# Altium footprint library standard-case.PcbLib: 285 footprints (part 4 of 18)
Each footprint in its own frame and in the unit in brackets; x right, y up, seen from the top. Pads: shape width x height; smd on the part's side, far side on the other; paste and mask are expansions set on the pad; w line width, h text height; cw(c..) or ccw(c..) is an arc to the next point about the centre after c.
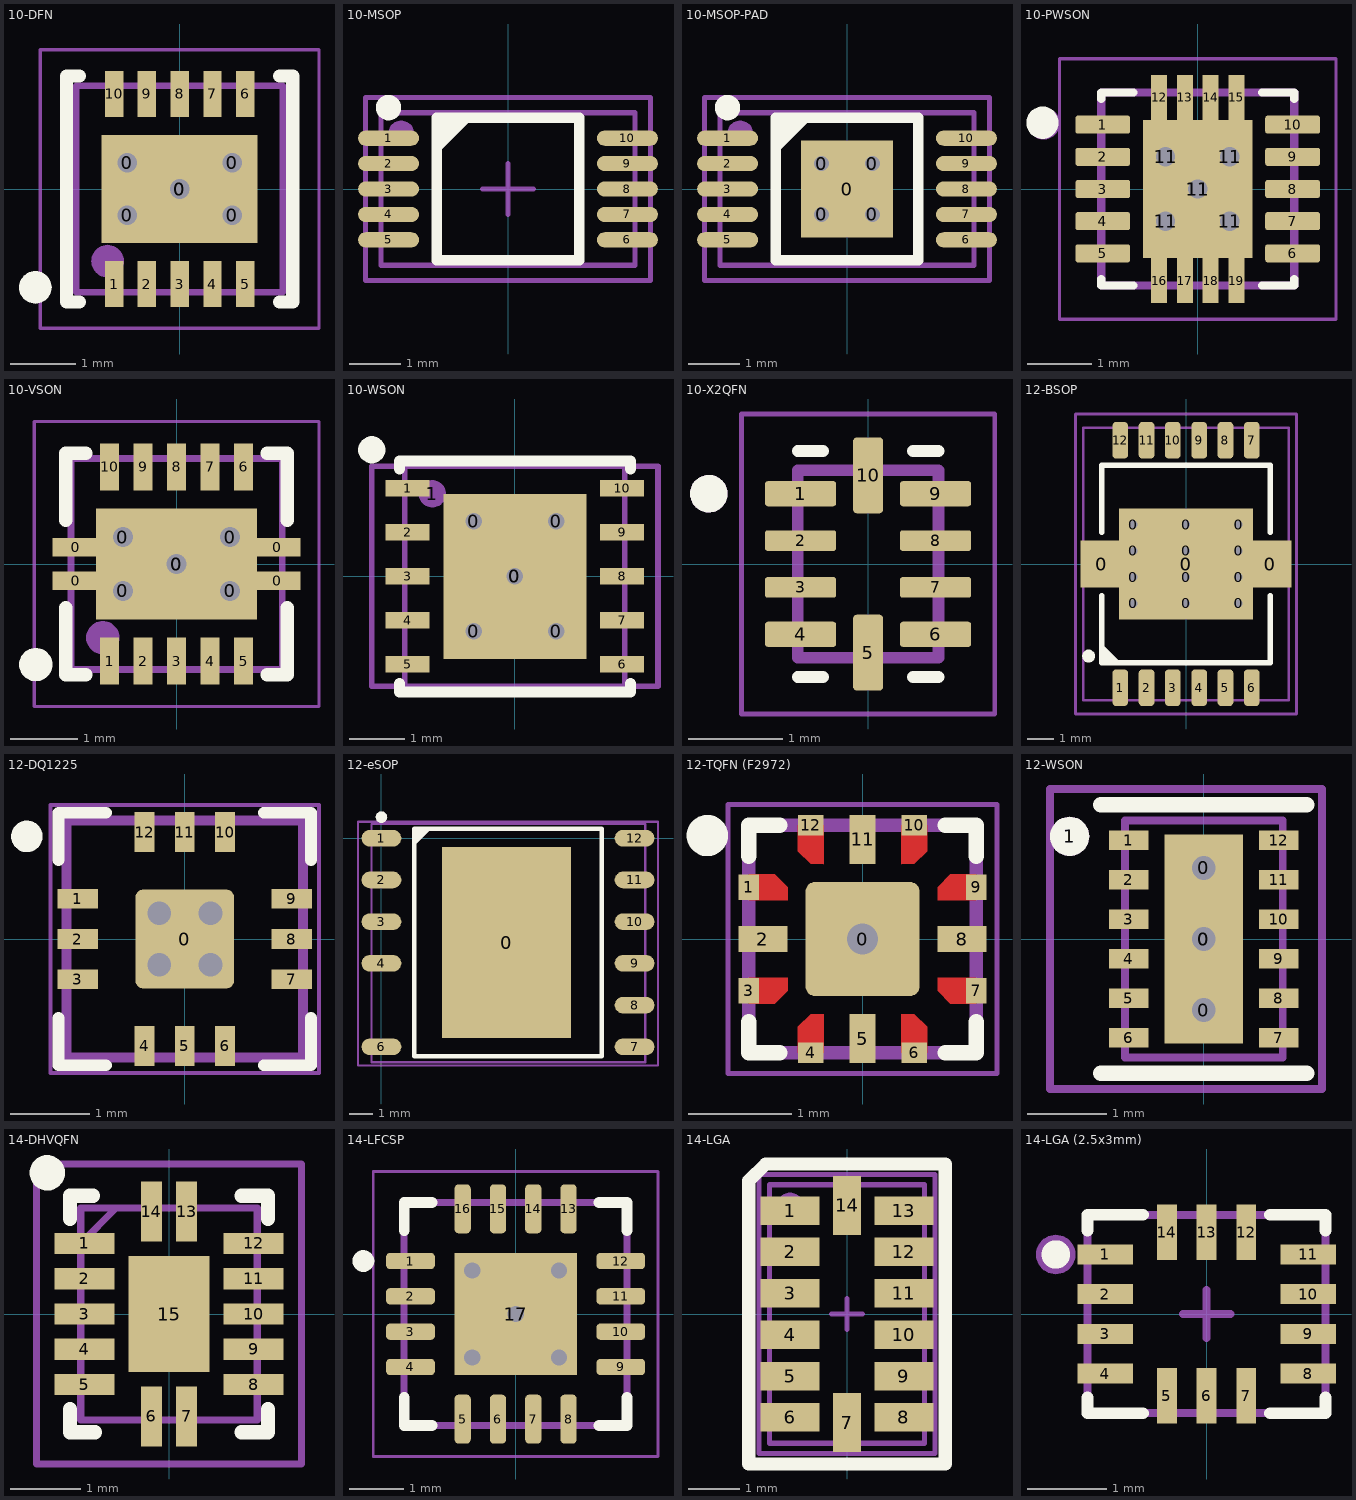
[diagram p3: the footprints below, top view; thin cyan lines are the x and y axes]

## 10-DFN [mm] "3x3 mm, pitch 0.5 mm, power pad"
height 1
pads (18):
  round 0.7 hole 0.3: 0(-0.8,-0.4) 0(-0.8,0.4) 0(0,0) 0(0.8,-0.4) 0(0.8,0.4)
  rect 2.38x1.64 smd mask+0.11: 0(0,0)
  rect 0.28x0.7 smd mask+0.11: 1(-1,-1.45) 2(-0.5,-1.45) 3(0,-1.45) 4(0.5,-1.45) 5(1,-1.45) 6(1,1.45) 7(0.5,1.45) 8(0,1.45) 9(-0.5,1.45) 10(-1,1.45)
  round 0.5 on Top Overlay: ""(-2.2,-1.5)
  round 0.5 on Mech1: ""(-1.1,-1.1)
Top Overlay:
  lines w0.2: -1.525,-1.725 -1.725,-1.725 -1.725,0.275 -1.725,1.725 -1.525,1.725 ; 1.525,-1.725 1.725,-1.725 1.725,0.275 1.725,1.725 1.525,1.725
Mechanical 1:
  lines w0.1: -1.575,-1.575 1.575,-1.575 1.575,1.575 -1.575,1.575 -1.575,-1.575
Mechanical 15:
  lines w0.05: -2.125,-2.125 2.125,-2.125 2.125,2.125 -2.125,2.125 -2.125,-2.125
3D body "User Library-My-DFN-10-3x3-0_5.STEP": height 0.8, standoff 0, extent -1.55,-1.56 1.55,1.56

## 10-MSOP [mm] "3x3 mm, pitch 0.5 mm"
height 1.1
pads (11):
  rrect100% 1.2x0.3 smd: 1(-2.35,1) 2(-2.35,0.5) 3(-2.35,0) 4(-2.35,-0.5) 5(-2.35,-1) 6(2.35,-1) 7(2.35,-0.5) 8(2.35,0) 9(2.35,0.5) 10(2.35,1)
  round 0.5 on Mech1: ""(-2.1,1.1)
Top Overlay:
  circle w0.25: c-2.35,1.6 r0.125
  region: -1.4,1.4 -1.4,0.68 -0.68,1.4
  lines w0.2: -1.4,-1.4 1.4,-1.4 1.4,1.4 -1.4,1.4 -1.4,-1.4
Mechanical 1:
  lines w0.1: -2.5,-1.5 -2.5,1.5 2.5,1.5 2.5,-1.5 -2.5,-1.5
Mechanical 15:
  lines w0.1: -0.5,0 0.5,0 ; 0,-0.5 0,0.5 ; -2.8,-1.8 2.8,-1.8 2.8,1.8 -2.8,1.8 -2.8,-1.8
3D body "TSSOP-10.STEP": height 1.1, standoff 0, extent -2.5,-1.5 2.5,1.5

## 10-MSOP-PAD [mm] "3x3 mm, pitch 0.5 mm"
height 1.1
pads (16):
  round 0.7 hole 0.3 mask+0.075: 0(-0.5,-0.5) 0(-0.5,0.5) 0(0.5,-0.5) 0(0.5,0.5)
  rect 1.8x1.9 smd mask+0.075: 0(0,0)
  rrect100% 1.2x0.3 smd: 1(-2.35,1) 2(-2.35,0.5) 3(-2.35,0) 4(-2.35,-0.5) 5(-2.35,-1) 6(2.35,-1) 7(2.35,-0.5) 8(2.35,0) 9(2.35,0.5) 10(2.35,1)
  round 0.5 on Mech1: ""(-2.1,1.1)
Top Overlay:
  circle w0.25: c-2.35,1.6 r0.125
  region: -1.4,1.4 -1.4,0.68 -0.68,1.4
  lines w0.2: -1.4,-1.4 1.4,-1.4 1.4,1.4 -1.4,1.4 -1.4,-1.4
Mechanical 1:
  lines w0.1: -2.5,-1.5 -2.5,1.5 2.5,1.5 2.5,-1.5 -2.5,-1.5
Mechanical 15:
  lines w0.1: -0.5,0 0.5,0 ; 0,-0.5 0,0.5 ; -2.8,-1.8 2.8,-1.8 2.8,1.8 -2.8,1.8 -2.8,-1.8
3D body "TSSOP-10.STEP": height 1.1, standoff 0, extent -2.5,-1.5 2.5,1.5

## 10-PWSON [mm] "3x3 mm, pitch 0.5 mm, power pad with additional pins"
height 0.8
pads (24):
  rrect25% 0.85x0.28 smd: 1(-1.475,1) 2(-1.475,0.5) 3(-1.475,0) 4(-1.475,-0.5) 5(-1.475,-1) 6(1.475,-1) 7(1.475,-0.5) 8(1.475,0) 9(1.475,0.5) 10(1.475,1)
  round 0.5 hole 0.3: 11(-0.5,-0.5) 11(-0.5,0.5) 11(0,0) 11(0.5,-0.5) 11(0.5,0.5)
  rect 1.7x2.15 smd paste-2: 11(0,0)
  rect 0.25x0.7 smd: 12(-0.6,1.425) 13(-0.2,1.425) 14(0.2,1.425) 15(0.6,1.425) 16(-0.6,-1.425) 17(-0.2,-1.425) 18(0.2,-1.425) 19(0.6,-1.425)
Top Overlay:
  circle w0.3: c-2.414,1.031 r0.1
  lines w0.127: -1.5,-1.4 -1.5,-1.5 -1,-1.5 ; -1.5,1.4 -1.5,1.5 -1,1.5 ; 1,-1.5 1.5,-1.5 1.5,-1.4 ; 1,1.5 1.5,1.5 1.5,1.4
Top Paste:
  region: 0.76,-1.012 0.11,-1.012 0.11,-0.11 0.76,-0.11
  region: -0.11,-1.01 -0.76,-1.01 -0.76,-0.11 -0.11,-0.11
  region: 0.76,0.11 0.11,0.11 0.11,1.01 0.76,1.01
  region: -0.11,0.11 -0.761,0.11 -0.761,1.01 -0.11,1.01
Mechanical 13:
  circle w0.3: c-2.395,1.02 r0.1
  lines w0.127: -1.5,-1.5 -1.5,1.5 1.5,1.5 1.5,-1.5 -1.5,-1.5
Mechanical 15:
  lines w0.05: -2.15,-2.025 -2.15,2.025 2.15,2.025 2.15,-2.025 -2.15,-2.025
3D body "User Library-My-DFN-10-3x3-0_5.STEP": height 0.8, standoff 0, extent -1.56,-1.55 1.56,1.55

## 10-VSON [mm] "3x3 mm, pitch 0.5 mm, power pad"
height 1
pads (22):
  rect 0.7x0.28 smd mask+0.11: 0(-1.5,-0.25) 0(-1.5,0.25) 0(1.5,-0.25) 0(1.5,0.25)
  round 0.7 hole 0.3: 0(-0.8,-0.4) 0(-0.8,0.4) 0(0,0) 0(0.8,-0.4) 0(0.8,0.4)
  rect 2.4x1.65 smd mask+0.11: 0(0,0)
  rect 0.28x0.7 smd mask+0.11: 1(-1,-1.45) 2(-0.5,-1.45) 3(0,-1.45) 4(0.5,-1.45) 5(1,-1.45) 6(1,1.45) 7(0.5,1.45) 8(0,1.45) 9(-0.5,1.45) 10(-1,1.45)
  round 0.5 on Top Overlay: ""(-2.1,-1.5)
  round 0.5 on Mech1: ""(-1.1,-1.1)
Top Overlay:
  lines w0.2: -1.65,-0.65 -1.65,-1.65 -1.35,-1.65 ; -1.65,0.65 -1.65,1.65 -1.35,1.65 ; 1.35,-1.65 1.65,-1.65 1.65,-0.65 ; 1.35,1.65 1.65,1.65 1.65,0.65
Mechanical 1:
  lines w0.1: -1.575,-1.575 1.575,-1.575 1.575,1.575 -1.575,1.575 -1.575,-1.575
Mechanical 15:
  lines w0.05: -2.125,-2.125 2.125,-2.125 2.125,2.125 -2.125,2.125 -2.125,-2.125
3D body "User Library-My-DFN-10-3x3-0_5.STEP": height 0.8, standoff 0, extent -1.55,-1.56 1.55,1.56

## 10-WSON [mm] "4x4 mm, pitch 0.5 mm, power pad"
height 0.8
pads (18):
  round 0.7 hole 0.3: 0(-0.75,-1) 0(-0.75,1) 0(0,0) 0(0.75,-1) 0(0.75,1)
  rect 2.6x3 smd: 0(0,0)
  rect 0.8x0.3 smd: 1(-1.95,1.6) 2(-1.95,0.8) 3(-1.95,0) 4(-1.95,-0.8) 5(-1.95,-1.6) 6(1.95,-1.6) 7(1.95,-0.8) 8(1.95,0) 9(1.95,0.8) 10(1.95,1.6)
  round 0.5 on Mech1: 1(-1.5,1.5)
  round 0.5 on Top Overlay: ""(-2.6,2.3)
Top Overlay:
  lines w0.2: -2.1,-1.95 -2.1,-2.1 2.1,-2.1 2.1,-1.95 ; -2.1,1.95 -2.1,2.1 2.1,2.1 2.1,1.95
Mechanical 1:
  lines w0.1: -2,-2 -2,2 2,2 2,-2 -2,-2
Mechanical 15:
  lines w0.1: -0.3,0 0.3,0 ; 0,-0.3 0,0.3 ; -2.6,-2 -2.6,2 2.6,2 2.6,-2 -2.6,-2
3D body "User Library-WSON-10-1.STEP": height 0.8, standoff 0, extent -2,-2 2,2

## 10-X2QFN [mm] "1.5x2x0.4"
pads (10):
  rrect25% 0.76x0.27 smd: 1(-0.72,0.75) 4(-0.72,-0.75) 6(0.72,-0.75) 9(0.72,0.75)
  rrect25% 0.76x0.22 smd: 2(-0.72,0.25) 3(-0.72,-0.25) 7(0.72,-0.25) 8(0.72,0.25)
  rrect25% 0.32x0.81 smd: 5(0,-0.945) 10(0,0.945)
Top Overlay:
  circle w0.2: c-1.7,0.75 r0.1
  lines w0.127: -0.75,-1.205 -0.48,-1.205 ; -0.75,1.205 -0.48,1.205 ; 0.48,-1.205 0.75,-1.205 ; 0.48,1.205 0.75,1.205
Mechanical 13:
  circle w0.2: c-1.7,0.75 r0.1
  lines w0.127: -0.75,-1 0.75,-1 0.75,1 -0.75,1 -0.75,-1
Mechanical 15:
  lines w0.05: -1.35,-1.6 1.35,-1.6 1.35,1.6 -1.35,1.6 -1.35,-1.6
3D body "TLA2024IRUGT.stp": height 0.4, standoff 0, extent -0.75,-1 0.75,1

## 12-BSOP [mm]
pads (28):
  rect 1.6x1.8 smd: 0(-3.2,0) 0(3.2,0)
  round 0.7 hole 0.3: 0(-2,-1.5) 0(-2,-0.5) 0(-2,0.5) 0(-2,1.5) 0(0,-1.5) 0(0,-0.5) 0(0,0.5) 0(0,1.5) 0(2,-1.5) 0(2,-0.5) 0(2,0.5) 0(2,1.5)
  rect 5.1x4.2 smd: 0(0,0)
  rrect50% 0.6x1.4 smd: 1(-2.5,-4.7) 2(-1.5,-4.7) 3(-0.5,-4.7) 4(0.5,-4.7) 5(1.5,-4.7) 6(2.5,-4.7) 7(2.5,4.7) 8(1.5,4.7) 9(0.5,4.7) 10(-0.5,4.7) 11(-1.5,4.7) 12(-2.5,4.7)
  round 0.5 on Top Overlay: ""(-3.7,-3.5)
Top Overlay:
  region: -3.2,-3.75 -2.48,-3.75 -3.2,-3.03
  lines w0.2: -3.2,-1.2 -3.2,-3.75 3.2,-3.75 3.2,-1.2 ; -3.2,1.2 -3.2,3.75 3.2,3.75 3.2,1.2
Mechanical 1:
  lines w0.1: -3.9,-5.171 3.9,-5.171 3.9,5.172 -3.9,5.172 -3.9,-5.171
Mechanical 15:
  lines w0.1: -0.5,0 0.5,0 ; 0,-0.5 0,0.5 ; -4.2,-5.7 -4.2,5.7 4.2,5.7 4.2,-5.7 -4.2,-5.7
3D body "12-BSOP.SLDPRT": height 2.53, standoff -0.02, extent -3.9,-5.171 3.9,5.172

## 12-DQ1225 [mm] "size 3x3 mm, pitch 0.51 mm"
pads (13):
  rrect15% 1.25x1.25 smd mask+0.05: 0(0,0)
  rect 0.51x0.25 smd mask+0.05: 1(-1.355,0.51) 2(-1.355,0) 3(-1.355,-0.51) 7(1.355,-0.51) 8(1.355,0) 9(1.355,0.51)
  rect 0.25x0.51 smd mask+0.05: 4(-0.51,-1.355) 5(0,-1.355) 6(0.51,-1.355) 10(0.51,1.355) 11(0,1.355) 12(-0.51,1.355)
via -0.325,0.325 diameter 0.6 hole 0.3
via 0.325,0.325 diameter 0.6 hole 0.3
via -0.325,-0.325 diameter 0.6 hole 0.3
via 0.325,-0.325 diameter 0.6 hole 0.3
Top Overlay:
  circle w0.2: c-2,1.3 r0.1
  lines w0.15: -1.6,-1 -1.6,-1.6 -1,-1.6 ; -1.6,1 -1.6,1.6 -1,1.6 ; 1,-1.6 1.6,-1.6 1.6,-1 ; 1,1.6 1.6,1.6 1.6,1
Top Paste:
  region: 0.5,-0.5 -0.5,-0.5 -0.5,0.5 0.5,0.5
Mechanical 13:
  lines w0.127: -1.5,-1.5 1.5,-1.5 1.5,1.5 -1.5,1.5 -1.5,-1.5
Mechanical 15:
  lines w0.05: -1.7,-1.7 -1.7,1.7 1.7,1.7 1.7,-1.7 -1.7,-1.7
3D body: height 0.89, standoff 0.01, extent -1.502,-1.5 1.5,1.5

## 12-eSOP [mm]
pads (14):
  rect 5.5x8.15 smd: 0(5.34,-4.45)
  oval 1.7x0.71 smd: 1(0,0) 2(0,-1.78) 3(0,-3.56) 4(0,-5.34) 6(0,-8.9) 7(10.8,-8.9) 8(10.8,-7.12) 9(10.8,-5.34) 10(10.8,-3.56) 11(10.8,-1.78) 12(10.8,0)
  round 0.5 on Top Overlay: ""(0,0.9)
  round 0.5 on Mech1: ""(0.1,0.1)
Top Overlay:
  region: 1.4,0.4 1.4,-0.32 2.12,0.4
  lines w0.2: 1.4,-9.3 9.4,-9.3 9.4,0.4 1.4,0.4 1.4,-9.3
Mechanical 1:
  lines w0.1: -0.425,-9.555 -0.425,0.605 11.255,0.605 11.255,-9.555 -0.425,-9.555
Mechanical 15:
  lines w0.1: -1,-9.7 -1,0.7 11.8,0.7 11.8,-9.7 -1,-9.7
3D body "User Library-eSOP-12B.STEP": height 2.49, standoff 0.01, extent -0.425,-9.555 11.255,0.605

## 12-TQFN (F2972) [mm] "size 2x2 mm, pitch 0.5 mm"
pads (13):
  rrect15% 1.1x1.1 smd mask+0.05: 0(0,0)
  rect 0.2x0.25 smd mask+0.05: 1(-1.1,0.5) 3(-1.1,-0.5) 7(1.1,-0.5) 9(1.1,0.5)
  rect 0.475x0.25 smd mask+0.05: 2(-0.962,0) 8(0.962,0)
  rect 0.25x0.2 smd mask+0.05: 4(-0.5,-1.1) 6(0.5,-1.1) 10(0.5,1.1) 12(-0.5,1.1)
  rect 0.25x0.475 smd mask+0.05: 5(0,-0.962) 11(0,0.962)
via 0,0 diameter 0.6 hole 0.3
Top Layer:
  region: -1.1,0.625 -0.85,0.625 -0.725,0.5 -0.725,0.375 -1.1,0.375
  region: -1.1,-0.625 -0.85,-0.625 -0.725,-0.5 -0.725,-0.375 -1.1,-0.375
  region: -0.625,-1.1 -0.625,-0.85 -0.5,-0.725 -0.375,-0.725 -0.375,-1.1
  region: 0.625,-1.1 0.625,-0.85 0.5,-0.725 0.375,-0.725 0.375,-1.1
  region: 1.1,-0.625 0.85,-0.625 0.725,-0.5 0.725,-0.375 1.1,-0.375
  region: 1.1,0.625 0.85,0.625 0.725,0.5 0.725,0.375 1.1,0.375
  region: 0.625,1.1 0.625,0.85 0.5,0.725 0.375,0.725 0.375,1.1
  region: -0.625,1.1 -0.625,0.85 -0.5,0.725 -0.375,0.725 -0.375,1.1
Top Overlay:
  circle w0.2: c-1.5,1 r0.1
  lines w0.15: -1.1,-0.8 -1.1,-1.1 -0.8,-1.1 ; -1.1,0.8 -1.1,1.1 -0.8,1.1 ; 0.8,-1.1 1.1,-1.1 1.1,-0.8 ; 0.8,1.1 1.1,1.1 1.1,0.8
Top Paste:
  region: 0.5,-0.5 -0.5,-0.5 -0.5,0.5 0.5,0.5
Mechanical 13:
  lines w0.127: -1.1,-1.1 -1.1,1.1 1.1,1.1 1.1,-1.1 -1.1,-1.1
Mechanical 15:
  lines w0.05: -1.3,-1.3 1.3,-1.3 1.3,1.3 -1.3,1.3 -1.3,-1.3
3D body "F2972NEGK8.stp": height 0.55, standoff 0, extent -1.05,-1.05 1.05,1.05

## 12-WSON [mm] "2x3 mm, pitch 0.5 mm, power pad"
height 0.8
pads (18):
  round 0.7 hole 0.3: 0(0,-0.9) 0(0,0) 0(0,0.9)
  rect 1x2.65 smd: 0(0,0)
  round 0.5 on Mech1: 1(-1.7,1.3)
  rect 0.5x0.25 smd: 1(-0.95,1.25) 2(-0.95,0.75) 3(-0.95,0.25) 4(-0.95,-0.25) 5(-0.95,-0.75) 6(-0.95,-1.25) 7(0.95,-1.25) 8(0.95,-0.75) 9(0.95,-0.25) 10(0.95,0.25) 11(0.95,0.75) 12(0.95,1.25)
  round 0.5 on Top Overlay: ""(-1.7,1.3)
Top Overlay:
  lines w0.2: -1.3,-1.7 1.3,-1.7 ; -1.3,1.7 1.3,1.7
Mechanical 1:
  lines w0.1: -1,-1.5 -1,1.5 1,1.5 1,-1.5 -1,-1.5
Mechanical 15:
  lines w0.1: -0.3,0 0.3,0 ; 0,-0.3 0,0.3 ; -1.95,-1.9 -1.95,1.9 1.5,1.9 1.5,-1.9 -1.95,-1.9
3D body "WSON-10.STEP": height 0.8, standoff 0, extent -1,-1.5 1,1.5

## 14-DHVQFN [mm]
pads (15):
  rect 0.85x0.3 smd: 1(-1.2,1) 2(-1.2,0.5) 3(-1.2,0) 4(-1.2,-0.5) 5(-1.2,-1) 8(1.2,-1) 9(1.2,-0.5) 10(1.2,0) 11(1.2,0.5) 12(1.2,1)
  rect 0.3x0.85 smd: 6(-0.25,-1.45) 7(0.25,-1.45) 13(0.25,1.45) 14(-0.25,1.45)
  rect 1.15x1.65 smd: 15(0,0)
Top Overlay:
  circle w0.25: c-1.725,2 r0.125
  lines w0.2: -1.4,-1.675 -1.4,-1.35 ; -1.4,1.35 -1.4,1.675 -1.075,1.675 ; -1.375,-1.675 -1.05,-1.675 ; 1.025,-1.675 1.35,-1.675 ; 1.025,1.675 1.35,1.675 ; 1.4,-1.675 1.4,-1.35 ; 1.4,1.35 1.4,1.675
Mechanical 13:
  lines w0.1: -1.25,1 -0.75,1.5 ; -1.25,-1.5 1.25,-1.5 1.25,1.5 -1.25,1.5 -1.25,-1.5
Mechanical 15:
  lines w0.1: -1.875,-2.125 1.875,-2.125 1.875,2.125 -1.875,2.125 -1.875,-2.125
3D body "74LVC125ABQ,115.stp": height 1, standoff 0, extent -1.3,-1.55 1.3,1.55

## 14-LFCSP [mm]
pads (17):
  rrect50% 0.9x0.3 smd: 1(-1.935,0.975) 2(-1.935,0.325) 3(-1.935,-0.325) 4(-1.935,-0.975) 9(1.935,-0.975) 10(1.935,-0.325) 11(1.935,0.325) 12(1.935,0.975)
  rrect50% 0.3x0.9 smd: 5(-0.975,-1.935) 6(-0.325,-1.935) 7(0.325,-1.935) 8(0.975,-1.935) 13(0.975,1.935) 14(0.325,1.935) 15(-0.325,1.935) 16(-0.975,1.935)
  rect 2.25x2.25 smd mask+0.102: 17(0,0)
via 0,0 diameter 0.6 hole 0.3
via 0.8,-0.8 diameter 0.6 hole 0.3
via -0.8,-0.8 diameter 0.6 hole 0.3
via 0.8,0.8 diameter 0.6 hole 0.3
via -0.8,0.8 diameter 0.6 hole 0.3
Top Overlay:
  circle w0.2: c-2.8,0.975 r0.1
  lines w0.2: -2.05,-1.538 -2.05,-2.05 -1.538,-2.05 ; -2.05,1.538 -2.05,2.05 -1.538,2.05 ; 1.538,-2.05 2.05,-2.05 2.05,-1.538 ; 1.538,2.05 2.05,2.05 2.05,1.538
Top Paste:
  region: 0.791,-0.792 -0.792,-0.792 -0.792,0.791 0.791,0.791
Mechanical 13:
  lines w0.127: -2.05,-2.05 -2.05,2.05 2.05,2.05 2.05,-2.05 -2.05,-2.05
Mechanical 15:
  lines w0.05: -2.62,-2.62 2.62,-2.62 2.62,2.62 -2.62,2.62 -2.62,-2.62
3D body "QFN-16 (4x4x0.9).step": height 0.93, standoff 0.01, extent -2,-2.011 2,1.989

## 14-LGA [mm]
height 1
pads (15):
  rect 1.145x0.55 smd: 1(-1.1,2) 2(-1.1,1.2) 3(-1.1,0.4) 4(-1.1,-0.4) 5(-1.1,-1.2) 6(-1.1,-2) 8(1.1,-2) 9(1.1,-1.2) 10(1.1,-0.4) 11(1.1,0.4) 12(1.1,1.2) 13(1.1,2)
  rect 0.55x1.145 smd: 7(0,-2.1) 14(0,2.1)
  round 0.5 on Mech1: ""(-1.1,2.1)
Top Overlay:
  lines w0.254: -1.9,-2.9 -1.9,2.575 -1.575,2.9 1.9,2.9 1.9,-2.9 -1.9,-2.9
Mechanical 1:
  lines w0.1: -1.5,-2.5 -1.5,2.5 1.5,2.5 1.5,-2.5 -1.5,-2.5
Mechanical 15:
  lines w0.1: -0.3,0 0.3,0 ; 0,-0.3 0,0.3 ; -1.7,-2.7 1.7,-2.7 1.7,2.7 -1.7,2.7 -1.7,-2.7
3D body "SW3dPS-LGA-14.STEP": height 1.03, standoff -0.4, extent -1.49,-2.5 1.51,2.5

## 14-LGA (2.5x3mm) [mm]
height 1
pads (15):
  rect 0.7x0.25 smd: 1(-1.28,0.75) 2(-1.28,0.25) 3(-1.28,-0.25) 4(-1.28,-0.75) 8(1.28,-0.75) 9(1.28,-0.25) 10(1.28,0.25) 11(1.28,0.75)
  rect 0.25x0.7 smd: 5(-0.5,-1.03) 6(0,-1.03) 7(0.5,-1.03) 12(0.5,1.03) 13(0,1.03) 14(-0.5,1.03)
  round 0.5 on Mech1: ""(-1.9,0.75)
Top Overlay:
  circle w0.2: c-1.9,0.75 r0.079
  lines w0.15: -1.5,-1.05 -1.5,-1.25 -0.8,-1.25 ; -1.5,1.05 -1.5,1.25 -0.8,1.25 ; 0.8,-1.25 1.5,-1.25 1.5,-1.05 ; 0.8,1.25 1.5,1.25 1.5,1.05
Mechanical 1:
  lines w0.1: -1.5,-1.25 -1.5,1.25 1.5,1.25 1.5,-1.25 -1.5,-1.25
Mechanical 15:
  lines w0.1: -0.3,0 0.3,0 ; 0,-0.3 0,0.3 ; -1.5,-1.25 1.5,-1.25 1.5,1.25 -1.5,1.25 -1.5,-1.25
3D body "LGA(2.5x3x0.91mm).STEP": height 0.9, standoff 0, extent -1.5,-1.25 1.5,1.25